# Altium footprint library ICs_VendorSpecific.PcbLib: 247 footprints (part 10 of 19)
Each footprint in its own frame and in the unit in brackets; x right, y up, seen from the top. Pads: shape width x height; smd on the part's side, far side on the other; paste and mask are expansions set on the pad; w line width, h text height; cw(c..) or ccw(c..) is an arc to the next point about the centre after c.
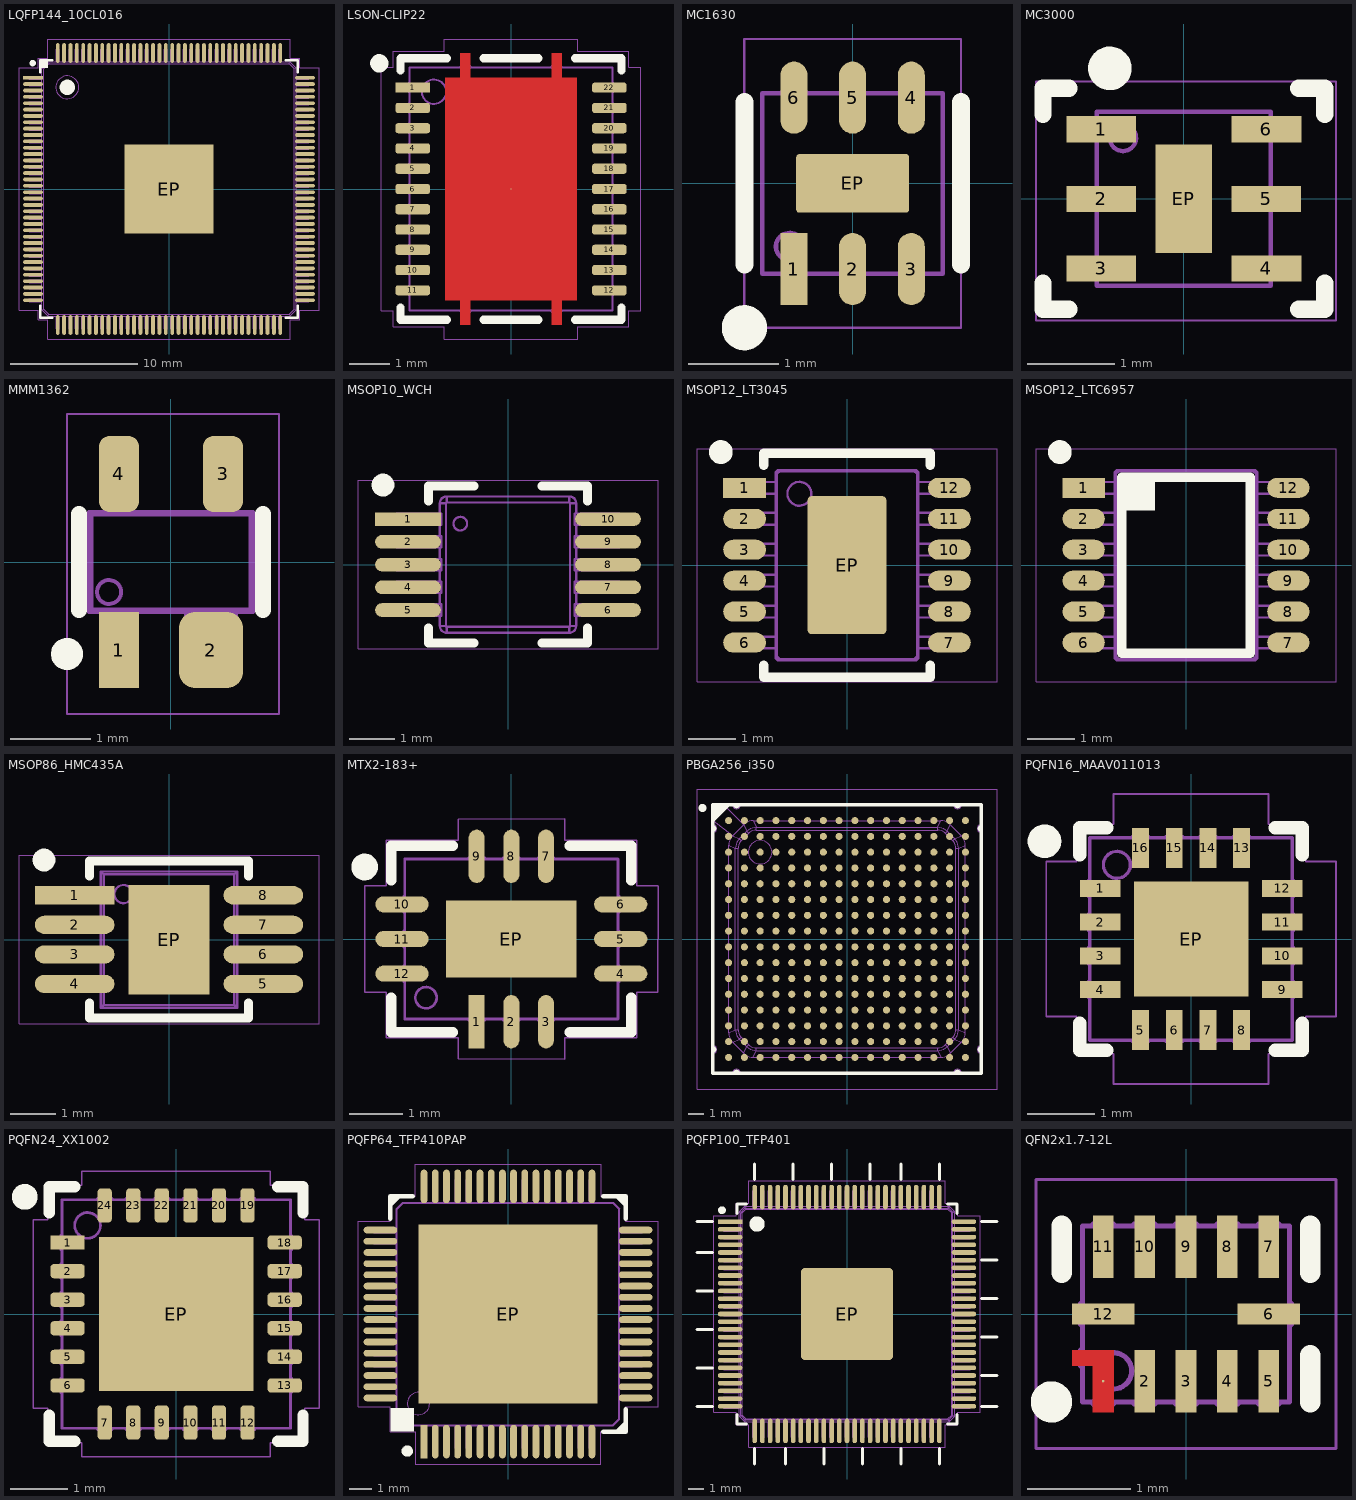
[diagram p9: the footprints below, top view; thin cyan lines are the x and y axes]

## LQFP144_10CL016 [mm] "LQFP-144, 144-Leads, Body 20.00x20.00mm, Pitch 0.50mm, Thermal Pad 6.7x6.7mm"
height 1.4
pads (145):
  rect 1.55x0.3 smd paste+0 mask+0.05: 1(-10.7,8.75)
  oval 1.55x0.3 smd paste+0 mask+0.05: 2(-10.7,8.25) 3(-10.7,7.75) 4(-10.7,7.25) 5(-10.7,6.75) 6(-10.7,6.25) 7(-10.7,5.75) 8(-10.7,5.25) 9(-10.7,4.75) 10(-10.7,4.25) 11(-10.7,3.75) 12(-10.7,3.25) 13(-10.7,2.75) 14(-10.7,2.25) 15(-10.7,1.75) 16(-10.7,1.25) 17(-10.7,0.75) 18(-10.7,0.25) 19(-10.7,-0.25) 20(-10.7,-0.75) 21(-10.7,-1.25) 22(-10.7,-1.75) 23(-10.7,-2.25) 24(-10.7,-2.75) 25(-10.7,-3.25) 26(-10.7,-3.75) 27(-10.7,-4.25) 28(-10.7,-4.75) 29(-10.7,-5.25) 30(-10.7,-5.75) 31(-10.7,-6.25) 32(-10.7,-6.75) 33(-10.7,-7.25) 34(-10.7,-7.75) 35(-10.7,-8.25) 36(-10.7,-8.75) 73(10.7,-8.75) 74(10.7,-8.25) 75(10.7,-7.75) 76(10.7,-7.25) 77(10.7,-6.75) 78(10.7,-6.25) 79(10.7,-5.75) 80(10.7,-5.25) 81(10.7,-4.75) 82(10.7,-4.25) 83(10.7,-3.75) 84(10.7,-3.25) 85(10.7,-2.75) 86(10.7,-2.25) 87(10.7,-1.75) 88(10.7,-1.25) 89(10.7,-0.75) 90(10.7,-0.25) 91(10.7,0.25) 92(10.7,0.75) 93(10.7,1.25) 94(10.7,1.75) 95(10.7,2.25) 96(10.7,2.75) 97(10.7,3.25) 98(10.7,3.75) 99(10.7,4.25) 100(10.7,4.75) 101(10.7,5.25) 102(10.7,5.75) 103(10.7,6.25) 104(10.7,6.75) 105(10.7,7.25) 106(10.7,7.75) 107(10.7,8.25) 108(10.7,8.75)
  oval 0.3x1.55 smd paste+0 mask+0.05: 37(-8.75,-10.7) 38(-8.25,-10.7) 39(-7.75,-10.7) 40(-7.25,-10.7) 41(-6.75,-10.7) 42(-6.25,-10.7) 43(-5.75,-10.7) 44(-5.25,-10.7) 45(-4.75,-10.7) 46(-4.25,-10.7) 47(-3.75,-10.7) 48(-3.25,-10.7) 49(-2.75,-10.7) 50(-2.25,-10.7) 51(-1.75,-10.7) 52(-1.25,-10.7) 53(-0.75,-10.7) 54(-0.25,-10.7) 55(0.25,-10.7) 56(0.75,-10.7) 57(1.25,-10.7) 58(1.75,-10.7) 59(2.25,-10.7) 60(2.75,-10.7) 61(3.25,-10.7) 62(3.75,-10.7) 63(4.25,-10.7) 64(4.75,-10.7) 65(5.25,-10.7) 66(5.75,-10.7) 67(6.25,-10.7) 68(6.75,-10.7) 69(7.25,-10.7) 70(7.75,-10.7) 71(8.25,-10.7) 72(8.75,-10.7) 109(8.75,10.7) 110(8.25,10.7) 111(7.75,10.7) 112(7.25,10.7) 113(6.75,10.7) 114(6.25,10.7) 115(5.75,10.7) 116(5.25,10.7) 117(4.75,10.7) 118(4.25,10.7) 119(3.75,10.7) 120(3.25,10.7) 121(2.75,10.7) 122(2.25,10.7) 123(1.75,10.7) 124(1.25,10.7) 125(0.75,10.7) 126(0.25,10.7) 127(-0.25,10.7) 128(-0.75,10.7) 129(-1.25,10.7) 130(-1.75,10.7) 131(-2.25,10.7) 132(-2.75,10.7) 133(-3.25,10.7) 134(-3.75,10.7) 135(-4.25,10.7) 136(-4.75,10.7) 137(-5.25,10.7) 138(-5.75,10.7) 139(-6.25,10.7) 140(-6.75,10.7) 141(-7.25,10.7) 142(-7.75,10.7) 143(-8.25,10.7) 144(-8.75,10.7)
  rect 7x7 smd paste-5 mask+0.05: EP(0,0)
Top Overlay:
  circle w0.25: c-10.725,9.9 r0.125
  circle w0.6: c-8,8 r0.3
  rectangle: -10.175,9.5 -9.5,10.175
  lines w0.2: -10.125,-9.2 -10.125,-10.125 -9.2,-10.125 ; -10.125,9.2 -10.125,10.125 -9.2,10.125 ; -10.075,9.6 -10.075,10.075 -9.6,10.075 ; 9.2,-10.125 10.125,-10.125 10.125,-9.2 ; 9.2,10.125 10.125,10.125 10.125,9.2
Top Paste:
  rectangle: 1.95,1.95 3.45,3.45
  rectangle: -3.45,1.95 -1.95,3.45
  rectangle: -1.65,1.95 -0.15,3.45
  rectangle: 0.15,1.95 1.65,3.45
  rectangle: -3.45,0.15 -1.95,1.65
  rectangle: -1.65,0.15 -0.15,1.65
  rectangle: 0.15,0.15 1.65,1.65
  rectangle: -3.45,-3.45 -1.95,-1.95
  rectangle: -3.45,-1.65 -1.95,-0.15
  rectangle: 1.95,-3.45 3.45,-1.95
  rectangle: 1.95,-1.65 3.45,-0.15
  rectangle: 1.95,0.15 3.45,1.65
  rectangle: -1.65,-3.45 -0.15,-1.95
  rectangle: 0.15,-3.45 1.65,-1.95
  rectangle: -1.65,-1.65 -0.15,-0.15
  rectangle: 0.15,-1.65 1.65,-0.15
Top Courtyard:
  lines w0.025: -11.8,-9.55 -11.8,9.55 -10.3,9.55 -10.3,10.3 -9.55,10.3 -9.55,11.8 9.55,11.8 9.55,10.3 10.3,10.3 10.3,9.55 11.8,9.55 11.8,-9.55 10.3,-9.55 10.3,-10.3 9.55,-10.3 9.55,-11.8 -9.55,-11.8 -9.55,-10.3 -10.3,-10.3 -10.3,-9.55 -11.8,-9.55
Top Assembly:
  drawing of 1033 lines, arcs and shapes, not listed
  text ".Designator" at -6.763,-0.679 h3
3D body "LQFP144_10CL016.x_t": height 1.5, standoff 0, extent -11,-11 11,11

## LSON-CLIP22 [mm] "DFN, 22-Leads, Body 6x5mm, Pitch 0.50mm, Thermal Pad 3.24x5.49mm. TI Reference R-PSON-N22"
height 1.5
pads (23):
  rect 0.85x0.25 smd mask+0.05: 1(-2.425,2.5)
  rrect50% 0.85x0.25 smd mask+0.05: 2(-2.425,2) 3(-2.425,1.5) 4(-2.425,1) 5(-2.425,0.5) 6(-2.425,0) 7(-2.425,-0.5) 8(-2.425,-1) 9(-2.425,-1.5) 10(-2.425,-2) 11(-2.425,-2.5) 12(2.425,-2.5) 13(2.425,-2) 14(2.425,-1.5) 15(2.425,-1) 16(2.425,-0.5) 17(2.425,0) 18(2.425,0.5) 19(2.425,1) 20(2.425,1.5) 21(2.425,2) 22(2.425,2.5)
  round 0.025 smd paste-5 mask+0.05: EP(0,0)
Top Layer:
  region: -1.62,-2.74 -1.25,-2.74 -1.25,-3.35 -1,-3.35 -1,-2.74 1,-2.74 1,-3.35 1.25,-3.35 1.25,-2.74 1.62,-2.74 1.62,2.74 1.25,2.74 1.25,3.35 1,3.35 1,2.74 -1,2.74 -1,3.35 -1.25,3.35 -1.25,2.74 -1.62,2.74 -1.62,2.739
Top Overlay:
  circle w0.25: c-3.25,3.1 r0.1
  lines w0.2: -2.725,-2.925 -2.725,-3.225 -1.575,-3.225 ; -2.725,2.925 -2.725,3.225 -1.575,3.225 ; -0.675,-3.225 0.675,-3.225 ; -0.675,3.225 0.675,3.225 ; 1.575,-3.225 2.725,-3.225 2.725,-2.925 ; 1.575,3.225 2.725,3.225 2.725,2.925
Top Paste:
  region: 0.15,0.65 0.15,-0.65 1.45,-0.65 1.45,0.65
  region: 0.15,2.25 0.15,0.95 1.45,0.95 1.45,2.25
  region: 1.45,-2.25 1.45,-0.95 0.15,-0.95 0.15,-2.25
  region: -1.45,0.65 -1.45,-0.65 -0.15,-0.65 -0.15,0.65
  region: -1.45,2.25 -1.45,0.95 -0.15,0.95 -0.15,2.25
  region: -0.15,-2.25 -0.15,-0.95 -1.45,-0.95 -1.45,-2.25
Top Courtyard:
  lines w0.025: -3.2,-3 -2.9,-3 -2.9,-3.4 -1.65,-3.4 -1.65,-3.7 1.65,-3.7 1.65,-3.4 2.9,-3.4 2.9,-3 3.2,-3 3.2,3 2.9,3 2.9,3.4 1.65,3.4 1.65,3.7 -1.65,3.7 -1.65,3.4 -2.9,3.4 -2.9,3 -3.2,3 -3.2,-3
Top Assembly:
  circle w0.05: c-1.9,2.4 r0.3
  lines w0.05: -2.5,-2.625 -2.52,-2.625 -2.52,-2.375 -2.5,-2.375 ; -2.5,-2.125 -2.52,-2.125 -2.52,-1.875 -2.5,-1.875 ; -2.5,-1.625 -2.52,-1.625 -2.52,-1.375 -2.5,-1.375 ; -2.5,-1.125 -2.52,-1.125 -2.52,-0.875 -2.5,-0.875 ; -2.5,-0.625 -2.52,-0.625 -2.52,-0.375 -2.5,-0.375 ; -2.5,-0.125 -2.52,-0.125 -2.52,0.125 -2.5,0.125 ; -2.5,0.375 -2.52,0.375 -2.52,0.625 -2.5,0.625 ; -2.5,0.875 -2.52,0.875 -2.52,1.125 -2.5,1.125 ; -2.5,1.375 -2.52,1.375 -2.52,1.625 -2.5,1.625 ; -2.5,1.875 -2.52,1.875 -2.52,2.125 -2.5,2.125 ; -2.5,2.375 -2.52,2.375 -2.52,2.625 -2.5,2.625 ; -1.25,-3 -1.25,-3.02 -1,-3.02 -1,-3 ; -1.25,3 -1.25,3.02 -1,3.02 -1,3 ; 1,-3 1,-3.02 1.25,-3.02 1.25,-3 ; 1,3 1,3.02 1.25,3.02 1.25,3 ; 2.5,-2.625 2.52,-2.625 2.52,-2.375 2.5,-2.375 ; 2.5,-2.125 2.52,-2.125 2.52,-1.875 2.5,-1.875 ; 2.5,-1.625 2.52,-1.625 2.52,-1.375 2.5,-1.375 ; 2.5,-1.125 2.52,-1.125 2.52,-0.875 2.5,-0.875 ; 2.5,-0.625 2.52,-0.625 2.52,-0.375 2.5,-0.375 ; 2.5,-0.125 2.52,-0.125 2.52,0.125 2.5,0.125 ; 2.5,0.375 2.52,0.375 2.52,0.625 2.5,0.625 ; 2.5,0.875 2.52,0.875 2.52,1.125 2.5,1.125 ; 2.5,1.375 2.52,1.375 2.52,1.625 2.5,1.625 ; 2.5,1.875 2.52,1.875 2.52,2.125 2.5,2.125 ; 2.5,2.375 2.52,2.375 2.52,2.625 2.5,2.625 ; -2.5,-3 -2.5,3 2.5,3 2.5,-3 -2.5,-3
  text ".Designator" at -4.511,-0.453 h2
3D body "LSON-CLIP22(R-PSON-N22).x_t": height 1.52, standoff 0, extent -2.52,-3.02 2.52,3.02

## MC1630 [mm] "MC1630 Minicircuits case style"
height 0.8
pads (7):
  rect 0.3x0.8 smd paste+0 mask+0.05: 1(-0.65,-0.95)
  oval 0.3x0.8 smd paste+0 mask+0.05: 2(0,-0.95) 3(0.65,-0.95) 4(0.65,0.95) 5(0,0.95) 6(-0.65,0.95)
  rrect10% 1.25x0.65 smd mask+0.05: EP(0,0)
Top Overlay:
  circle w0.25: c-1.2,-1.6 r0.125
  lines w0.2: -1.2,-0.9 -1.2,0.9 ; 1.2,-0.9 1.2,0.9
Top Solder:
  rectangle: -1,-1.4 -0.85,-0.5
  region: 1,-0.5 0.65,-0.5 0.65,-1.4 1,-1.4
  region: 1,1.4 0.65,1.4 0.65,0.5 1,0.5
  rectangle: -1,0.5 -0.65,1.4
Top Courtyard:
  lines w0.025: -1.2,-1.6 -1.2,1.6 1.2,1.6 1.2,-1.6 -1.2,-1.6
Top Assembly:
  circle w0.05: c-0.7,-0.7 r0.15
  lines w0.05: -0.775,-1 -0.775,-1.025 -0.525,-1.025 -0.525,-1 ; -0.775,1 -0.775,1.025 -0.525,1.025 -0.525,1 ; -0.125,-1 -0.125,-1.025 0.125,-1.025 0.125,-1 ; -0.125,1 -0.125,1.025 0.125,1.025 0.125,1 ; 0.525,-1 0.525,-1.025 0.775,-1.025 0.775,-1 ; 0.525,1 0.525,1.025 0.775,1.025 0.775,1 ; -1,-1 -1,1 1,1 1,-1 -1,-1
  text ".Designator" at -2.704,-0.271 h1.2
3D body "MC1630_X_T.x_t": height 0.85, standoff 0, extent -1,-1.025 1,1.025

## MC3000 [mm] "Mini-Circuits MC3000 Case Style"
height 1
pads (7):
  rect 0.8x0.3 smd paste-0.023 mask+0.05: 1(-0.95,0.8) 2(-0.95,0) 3(-0.95,-0.8) 4(0.95,-0.8) 5(0.95,0) 6(0.95,0.8)
  rect 0.65x1.25 smd paste-0.045 mask+0.092: EP(0,0)
Top Overlay:
  circle w0.25: c-0.85,1.5 r0.125
  lines w0.2: -1.62,-0.97 -1.62,-1.27 -1.32,-1.27 ; -1.62,0.97 -1.62,1.27 -1.32,1.27 ; 1.32,-1.27 1.62,-1.27 1.62,-0.97 ; 1.32,1.27 1.62,1.27 1.62,0.97
Top Solder:
  rectangle: 0.5,0.47 1.4,0.6
  rectangle: -1.401,0.47 -0.501,0.6
  rectangle: -1.401,-0.6 -0.501,-0.47
  rectangle: 0.5,-0.6 1.4,-0.47
Top Courtyard:
  lines w0.025: -1.7,-1.4 -1.7,1.35 1.75,1.35 1.75,-1.4 -1.7,-1.4
Top Assembly:
  lines w0.05: -0.55,0.718 ccw(c-0.7,0.7) -0.549,0.696 ; -1,-1 -1,0 -1,1 0,1 1,1 1,0 1,-1 0,-1 -1,-1
  text ".Designator" at -3.378,-0.339 h1.5
3D body "MC3000.x_t": height 1.05, standoff 0, extent -1.02,-1 1.02,1

## MMM1362 [mm] "Case style MMM1362"
height 1.1
pads (4):
  rect 0.5x0.95 smd paste-0.025 mask+0.05: 1(-0.65,-1.1)
  rrect50% 0.8x0.95 smd paste-0.025 mask+0.05: 2(0.5,-1.1)
  rrect50% 0.5x0.95 smd paste-0.025 mask+0.05: 3(0.65,1.1) 4(-0.65,1.1)
Top Overlay:
  circle w0.2: c-1.3,-1.15 r0.1
  lines w0.2: -1.15,-0.6 -1.15,0.6 ; 1.15,-0.6 1.15,0.6
Top Courtyard:
  lines w0.025: -1.3,-1.9 1.35,-1.9 1.35,1.85 -1.3,1.85 -1.3,-1.9
Top Assembly:
  circle w0.05: c-0.775,-0.375 r0.15
  lines w0.05: -1.025,-0.625 -0.813,-0.625 ; -1.025,-0.625 -1.025,0.625 ; -1.025,-0.625 -0.995,-0.595 ; -1.025,0.625 -0.813,0.625 ; -1.025,0.625 -0.995,0.595 ; -0.995,-0.595 0.995,-0.595 ; -0.995,-0.595 -0.995,0.595 ; -0.995,0.595 0.995,0.595 ; -0.813,-0.961 -0.813,-1.055 -0.487,-1.055 -0.487,-0.961 ; -0.813,-0.961 -0.813,-0.893 ; -0.813,-0.961 -0.487,-0.961 ; -0.813,-0.893 -0.487,-0.893 ; -0.813,-0.893 -0.813,-0.834 ; -0.813,-0.834 -0.813,-0.686 ; -0.813,-0.834 -0.487,-0.834 ; -0.813,-0.686 -0.813,-0.625 ; -0.813,-0.686 -0.487,-0.686 ; -0.813,-0.625 -0.487,-0.625 ; -0.813,0.625 -0.487,0.625 ; -0.813,0.625 -0.813,0.686 ; -0.813,0.686 -0.487,0.686 ; -0.813,0.686 -0.813,0.834 ; -0.813,0.834 -0.813,0.893 ; -0.813,0.834 -0.487,0.834 ; -0.813,0.893 -0.813,0.961 ; -0.813,0.893 -0.487,0.893 ; -0.813,0.961 -0.813,1.055 -0.487,1.055 -0.487,0.961 ; -0.813,0.961 -0.487,0.961 ; -0.487,-0.961 -0.487,-0.893 ; -0.487,-0.893 -0.487,-0.834 ; -0.487,-0.834 -0.487,-0.686 ; -0.487,-0.686 -0.487,-0.625 ; -0.487,-0.625 0.188,-0.625 ; -0.487,0.625 0.487,0.625 ; -0.487,0.625 -0.487,0.686 ; -0.487,0.686 -0.487,0.834 ; -0.487,0.834 -0.487,0.893 ; -0.487,0.893 -0.487,0.961 ; 0.188,-0.961 0.188,-1.055 0.813,-1.055 0.812,-0.961 ; 0.188,-0.961 0.812,-0.961 ; 0.188,-0.961 0.188,-0.893 ; 0.188,-0.893 0.188,-0.834 ; 0.188,-0.893 0.812,-0.893 ; 0.188,-0.834 0.188,-0.686 ; 0.188,-0.834 0.813,-0.834 ; 0.188,-0.686 0.188,-0.625 ; 0.188,-0.686 0.813,-0.686 ; 0.188,-0.625 0.813,-0.625 ; 0.487,0.625 0.813,0.625 ; 0.487,0.625 0.487,0.686 ; 0.487,0.686 0.487,0.834 ; 0.487,0.686 0.813,0.686 ; 0.487,0.834 0.487,0.893 ; 0.487,0.834 0.812,0.834 ; 0.487,0.893 0.487,0.961 ; 0.487,0.893 0.812,0.893 ; 0.487,0.961 0.487,1.055 0.813,1.055 0.813,0.961 ; 0.487,0.961 0.813,0.961 ; 0.812,-0.961 0.812,-0.893 ; 0.812,-0.893 0.813,-0.834 ; 0.813,-0.834 0.813,-0.686 ; 0.813,-0.686 0.813,-0.625 ; 0.813,-0.625 1.025,-0.625 ; 0.813,0.625 1.025,0.625 ; 0.813,0.625 0.813,0.686 ; 0.813,0.686 0.812,0.834 ; 0.812,0.834 0.812,0.893 ; 0.812,0.893 0.813,0.961 ; 0.995,-0.595 1.025,-0.625 ; 0.995,-0.595 0.995,0.595 ; 0.995,0.595 1.025,0.625 ; 1.025,-0.625 1.025,0.625
  text ".Designator" at -2.252,-0.226 h1
3D body "MMM1362.x_t": height 1.1, standoff 0, extent -1.025,-1.055 1.025,1.055

## MSOP10_WCH [mm] "MSOP, 10-Leads, Body 3.00x3.00mm, Pitch 0.5mm"
height 0.85
pads (10):
  rect 1.45x0.3 smd paste+0 mask+0.05: 1(-2.2,1)
  oval 1.45x0.3 smd paste+0 mask+0.05: 2(-2.2,0.5) 3(-2.2,0) 4(-2.2,-0.5) 5(-2.2,-1) 6(2.2,-1) 7(2.2,-0.5) 8(2.2,0) 9(2.2,0.5) 10(2.2,1)
Top Overlay:
  circle w0.25: c-2.75,1.75 r0.125
  lines w0.2: -1.75,-1.4 -1.75,-1.725 -0.75,-1.725 ; -1.75,1.4 -1.75,1.725 -0.75,1.725 ; 0.75,-1.725 1.75,-1.725 1.75,-1.4 ; 0.75,1.725 1.75,1.725 1.75,1.4
Top Courtyard:
  lines w0.025: -3.3,-1.85 3.3,-1.85 3.3,1.85 -3.3,1.85 -3.3,-1.85
Top Assembly:
  drawing of 195 lines, arcs and shapes, not listed
  text ".Designator" at -3.378,-0.339 h1.5
3D body "MSOP10_WCH.x_t": height 0.93, standoff 0, extent -2.45,-1.5 2.45,1.5

## MSOP12_LT3045 [mm] "MSOP, 12-Leads, Body 3.00x4.00mm, Exposed Pad 1.651x2.845mm, Pitch 0.65mm. Reference LTC DWG # 05-08-1666 Rev G"
height 1.1
pads (13):
  rect 0.9x0.42 smd paste+0 mask+0.05: 1(-2.15,1.625)
  oval 0.9x0.42 smd paste+0 mask+0.05: 2(-2.15,0.975) 3(-2.15,0.325) 4(-2.15,-0.325) 5(-2.15,-0.975) 6(-2.15,-1.625) 7(2.15,-1.625) 8(2.15,-0.975) 9(2.15,-0.325) 10(2.15,0.325) 11(2.15,0.975) 12(2.15,1.625)
  rrect10% 1.65x2.9 smd paste+0 mask+0.05: EP(0,0)
Top Overlay:
  circle w0.25: c-2.65,2.375 r0.125
  lines w0.2: -1.75,-2.1 -1.75,-2.35 1.75,-2.35 1.75,-2.1 ; -1.75,2.1 -1.75,2.35 1.75,2.35 1.75,2.1
Top Courtyard:
  lines w0.025: -3.15,-2.45 -3.15,2.45 3.15,2.45 3.15,-2.45 -3.15,-2.45
Top Assembly:
  circle w0.05: c-1,1.5 r0.25
  lines w0.05: -2.063,-1.747 -2.063,-1.502 ; -2.063,-1.098 -2.063,-0.853 ; -2.063,-0.447 -2.063,-0.202 ; -2.063,0.202 -2.063,0.447 ; -2.063,0.853 -2.063,1.098 ; -2.063,1.502 -2.063,1.747 ; -1.982,-1.747 -1.982,-1.502 ; -1.982,-1.098 -1.982,-0.853 ; -1.982,-0.447 -1.982,-0.202 ; -1.982,0.202 -1.982,0.447 ; -1.982,0.853 -1.982,1.098 ; -1.982,1.502 -1.982,1.747 ; -1.926,-1.747 -1.926,-1.502 ; -1.926,-1.098 -1.926,-0.853 ; -1.926,-0.447 -1.926,-0.202 ; -1.926,0.202 -1.926,0.447 ; -1.926,0.853 -1.926,1.098 ; -1.926,1.502 -1.926,1.747 ; -1.752,-1.747 -1.752,-1.502 ; -1.752,-1.098 -1.752,-0.853 ; -1.752,-0.447 -1.752,-0.202 ; -1.752,0.202 -1.752,0.447 ; -1.752,0.853 -1.752,1.098 ; -1.752,1.502 -1.752,1.747 ; -1.5,-1.747 -2.45,-1.747 -2.45,-1.502 -1.5,-1.502 ; -1.5,-1.098 -2.45,-1.098 -2.45,-0.853 -1.5,-0.853 ; -1.5,-0.447 -2.45,-0.447 -2.45,-0.202 -1.5,-0.202 ; -1.5,0.202 -2.45,0.202 -2.45,0.447 -1.5,0.447 ; -1.5,0.853 -2.45,0.853 -2.45,1.098 -1.5,1.098 ; -1.5,1.502 -2.45,1.502 -2.45,1.747 -1.5,1.747 ; -1.449,2 -1.42,1.97 ; 1.449,2 1.42,1.97 ; 1.5,-1.747 2.45,-1.747 2.45,-1.502 1.5,-1.502 ; 1.5,-1.098 2.45,-1.098 2.45,-0.853 1.5,-0.853 ; 1.5,-0.447 2.45,-0.447 2.45,-0.202 1.5,-0.202 ; 1.5,0.202 2.45,0.202 2.45,0.447 1.5,0.447 ; 1.5,0.853 2.45,0.853 2.45,1.098 1.5,1.098 ; 1.5,1.502 2.45,1.502 2.45,1.747 1.5,1.747 ; 1.752,-1.747 1.752,-1.502 ; 1.752,-1.098 1.752,-0.853 ; 1.752,-0.447 1.752,-0.202 ; 1.752,0.202 1.752,0.447 ; 1.752,0.853 1.752,1.098 ; 1.752,1.502 1.752,1.747 ; 1.926,-1.747 1.926,-1.502 ; 1.926,-1.098 1.926,-0.853 ; 1.926,-0.447 1.926,-0.202 ; 1.926,0.202 1.926,0.447 ; 1.926,0.853 1.926,1.098 ; 1.926,1.502 1.926,1.747 ; 1.982,-1.747 1.982,-1.502 ; 1.982,-1.098 1.982,-0.853 ; 1.982,-0.447 1.982,-0.202 ; 1.982,0.202 1.982,0.447 ; 1.982,0.853 1.982,1.098 ; 1.982,1.502 1.982,1.747 ; 2.063,-1.747 2.063,-1.502 ; 2.063,-1.098 2.063,-0.853 ; 2.063,-0.447 2.063,-0.202 ; 2.063,0.202 2.063,0.447 ; 2.063,0.853 2.063,1.098 ; 2.063,1.502 2.063,1.747 ; -1.5,-1.95 -1.45,-2 ; -1.5,-1.949 -1.47,-1.92 ; -1.5,-1.95 -1.5,1.95 ; -1.5,1.95 -1.45,2 1.45,2 1.5,1.95 ; -1.5,1.95 -1.47,1.92 ; -1.47,-1.92 -1.47,1.92 ; -1.47,-1.92 -1.42,-1.97 ; -1.47,1.92 -1.42,1.97 ; -1.45,-2 1.45,-2 ; -1.45,-2 -1.42,-1.97 ; -1.42,-1.97 1.42,-1.97 ; -1.42,1.97 1.42,1.97 ; 1.42,-1.97 1.45,-2 ; 1.42,-1.97 1.47,-1.92 ; 1.42,1.97 1.47,1.92 ; 1.45,-2 1.5,-1.95 ; 1.47,-1.92 1.5,-1.949 ; 1.47,-1.92 1.47,1.92 ; 1.47,1.92 1.5,1.95 ; 1.5,-1.95 1.5,1.95
  text ".Designator" at 0.453,-4.511 h2
3D body "MSOP12_LT3045_X_T.x_t": height 0.93, standoff -0.03, extent -2.45,-2 2.45,2

## MSOP12_LTC6957 [mm] "MSOP, 12-Leads, Body 3.00x4.00mm, Pitch 0.65mm. Reference LTC DWG  # 05-08-1668 Rev A"
height 1.1
pads (12):
  rect 0.889x0.42 smd paste+0 mask+0.05: 1(-2.15,1.625)
  oval 0.889x0.42 smd paste+0 mask+0.05: 2(-2.15,0.975) 3(-2.15,0.325) 4(-2.15,-0.325) 5(-2.15,-0.975) 6(-2.15,-1.625) 7(2.15,-1.625) 8(2.15,-0.975) 9(2.15,-0.325) 10(2.15,0.325) 11(2.15,0.975) 12(2.15,1.625)
Top Overlay:
  circle w0.25: c-2.65,2.375 r0.125
  region: -0.65,1.15 -0.65,1.85 -1.35,1.85 -1.35,1.15
  lines w0.2: -1.35,-1.85 1.35,-1.85 1.35,1.85 -1.35,1.85 -1.35,-1.85
Top Courtyard:
  lines w0.025: -3.15,-2.45 -3.15,2.45 3.15,2.45 3.15,-2.45 -3.15,-2.45
Top Assembly:
  circle w0.05: c-1,1.5 r0.25
  lines w0.05: -2.063,-1.747 -2.063,-1.502 ; -2.063,-1.098 -2.063,-0.853 ; -2.063,-0.447 -2.063,-0.202 ; -2.063,0.202 -2.063,0.447 ; -2.063,0.853 -2.063,1.098 ; -2.063,1.502 -2.063,1.747 ; -1.982,-1.747 -1.982,-1.502 ; -1.982,-1.098 -1.982,-0.853 ; -1.982,-0.447 -1.982,-0.202 ; -1.982,0.202 -1.982,0.447 ; -1.982,0.853 -1.982,1.098 ; -1.982,1.502 -1.982,1.747 ; -1.926,-1.747 -1.926,-1.502 ; -1.926,-1.098 -1.926,-0.853 ; -1.926,-0.447 -1.926,-0.202 ; -1.926,0.202 -1.926,0.447 ; -1.926,0.853 -1.926,1.098 ; -1.926,1.502 -1.926,1.747 ; -1.752,-1.747 -1.752,-1.502 ; -1.752,-1.098 -1.752,-0.853 ; -1.752,-0.447 -1.752,-0.202 ; -1.752,0.202 -1.752,0.447 ; -1.752,0.853 -1.752,1.098 ; -1.752,1.502 -1.752,1.747 ; -1.5,-1.747 -2.45,-1.747 -2.45,-1.502 -1.5,-1.502 ; -1.5,-1.098 -2.45,-1.098 -2.45,-0.853 -1.5,-0.853 ; -1.5,-0.447 -2.45,-0.447 -2.45,-0.202 -1.5,-0.202 ; -1.5,0.202 -2.45,0.202 -2.45,0.447 -1.5,0.447 ; -1.5,0.853 -2.45,0.853 -2.45,1.098 -1.5,1.098 ; -1.5,1.502 -2.45,1.502 -2.45,1.747 -1.5,1.747 ; -1.449,2 -1.42,1.97 ; 1.449,2 1.42,1.97 ; 1.5,-1.747 2.45,-1.747 2.45,-1.502 1.5,-1.502 ; 1.5,-1.098 2.45,-1.098 2.45,-0.853 1.5,-0.853 ; 1.5,-0.447 2.45,-0.447 2.45,-0.202 1.5,-0.202 ; 1.5,0.202 2.45,0.202 2.45,0.447 1.5,0.447 ; 1.5,0.853 2.45,0.853 2.45,1.098 1.5,1.098 ; 1.5,1.502 2.45,1.502 2.45,1.747 1.5,1.747 ; 1.752,-1.747 1.752,-1.502 ; 1.752,-1.098 1.752,-0.853 ; 1.752,-0.447 1.752,-0.202 ; 1.752,0.202 1.752,0.447 ; 1.752,0.853 1.752,1.098 ; 1.752,1.502 1.752,1.747 ; 1.926,-1.747 1.926,-1.502 ; 1.926,-1.098 1.926,-0.853 ; 1.926,-0.447 1.926,-0.202 ; 1.926,0.202 1.926,0.447 ; 1.926,0.853 1.926,1.098 ; 1.926,1.502 1.926,1.747 ; 1.982,-1.747 1.982,-1.502 ; 1.982,-1.098 1.982,-0.853 ; 1.982,-0.447 1.982,-0.202 ; 1.982,0.202 1.982,0.447 ; 1.982,0.853 1.982,1.098 ; 1.982,1.502 1.982,1.747 ; 2.063,-1.747 2.063,-1.502 ; 2.063,-1.098 2.063,-0.853 ; 2.063,-0.447 2.063,-0.202 ; 2.063,0.202 2.063,0.447 ; 2.063,0.853 2.063,1.098 ; 2.063,1.502 2.063,1.747 ; -1.5,-1.95 -1.45,-2 ; -1.5,-1.949 -1.47,-1.92 ; -1.5,-1.95 -1.5,1.95 ; -1.5,1.95 -1.45,2 1.45,2 1.5,1.95 ; -1.5,1.95 -1.47,1.92 ; -1.47,-1.92 -1.47,1.92 ; -1.47,-1.92 -1.42,-1.97 ; -1.47,1.92 -1.42,1.97 ; -1.45,-2 1.45,-2 ; -1.45,-2 -1.42,-1.97 ; -1.42,-1.97 1.42,-1.97 ; -1.42,1.97 1.42,1.97 ; 1.42,-1.97 1.45,-2 ; 1.42,-1.97 1.47,-1.92 ; 1.42,1.97 1.47,1.92 ; 1.45,-2 1.5,-1.95 ; 1.47,-1.92 1.5,-1.949 ; 1.47,-1.92 1.47,1.92 ; 1.47,1.92 1.5,1.95 ; 1.5,-1.95 1.5,1.95
  text ".Designator" at 0.453,-4.511 h2
3D body "MSOP12_LTC6957.x_t": height 0.93, standoff -0.03, extent -2.45,-2 2.45,2

## MSOP86_HMC435A [mm] "MSOP, 8-Leads, Body 3.00x3.00mm, Exposed Pad 1.78x2.41mm, Pitch 0.65mm"
height 0.85
pads (9):
  rect 1.75x0.4 smd paste+0 mask+0.05: 1(-2.075,0.975)
  oval 1.75x0.4 smd paste+0 mask+0.05: 2(-2.075,0.325) 3(-2.075,-0.325) 4(-2.075,-0.975) 5(2.075,-0.975) 6(2.075,-0.325) 7(2.075,0.325) 8(2.075,0.975)
  rect 1.78x2.41 smd paste-2 mask+0.05: EP(0,0)
Top Overlay:
  circle w0.25: c-2.75,1.75 r0.125
  lines w0.2: -1.75,-1.4 -1.75,-1.725 1.75,-1.725 1.75,-1.4 ; -1.75,1.4 -1.75,1.725 1.75,1.725 1.75,1.4
Top Paste:
  region: -0.1,1.1 -0.7,1.1 -0.7,0.5 -0.1,0.5
  region: -0.1,0.3 -0.7,0.3 -0.7,-0.3 -0.1,-0.3
  region: -0.1,-0.5 -0.7,-0.5 -0.7,-1.1 -0.1,-1.1
  rectangle: 0.1,0.5 0.7,1.1
  rectangle: 0.1,-0.3 0.7,0.3
  rectangle: 0.1,-1.1 0.7,-0.5
Top Courtyard:
  lines w0.025: -3.3,-1.85 3.3,-1.85 3.3,1.85 -3.3,1.85 -3.3,-1.85
Top Assembly:
  circle w0.05: c-1,1 r0.2
  lines w0.05: -2.1,-1.125 -2,-1.125 ; -2.1,-1.125 -2.1,-0.825 ; -2.1,-1.125 -2.5,-1.125 -2.5,-0.825 -2.1,-0.825 ; -2.1,-0.825 -2,-0.825 ; -2.1,-0.475 -2,-0.475 ; -2.1,-0.475 -2.1,-0.175 ; -2.1,-0.475 -2.5,-0.475 -2.5,-0.175 -2.1,-0.175 ; -2.1,-0.175 -2,-0.175 ; -2.1,0.175 -2,0.175 ; -2.1,0.175 -2.1,0.475 ; -2.1,0.175 -2.5,0.175 -2.5,0.475 -2.1,0.475 ; -2.1,0.475 -2,0.475 ; -2.1,0.825 -2,0.825 ; -2.1,0.825 -2.1,1.125 ; -2.1,0.825 -2.5,0.825 -2.5,1.125 -2.1,1.125 ; -2.1,1.125 -2,1.125 ; -2,-1.125 -1.8,-1.125 ; -2,-1.125 -2,-0.825 ; -2,-0.825 -1.8,-0.825 ; -2,-0.475 -1.8,-0.475 ; -2,-0.475 -2,-0.175 ; -2,-0.175 -1.8,-0.175 ; -2,0.175 -1.8,0.175 ; -2,0.175 -2,0.475 ; -2,0.475 -1.8,0.475 ; -2,0.825 -1.8,0.825 ; -2,0.825 -2,1.125 ; -2,1.125 -1.8,1.125 ; -1.8,-1.125 -1.8,-0.825 ; -1.8,-1.125 -1.5,-1.125 ; -1.8,-0.825 -1.5,-0.825 ; -1.8,-0.475 -1.8,-0.175 ; -1.8,-0.475 -1.5,-0.475 ; -1.8,-0.175 -1.5,-0.175 ; -1.8,0.175 -1.8,0.475 ; -1.8,0.175 -1.5,0.175 ; -1.8,0.475 -1.5,0.475 ; -1.8,0.825 -1.8,1.125 ; -1.8,0.825 -1.5,0.825 ; -1.8,1.125 -1.5,1.125 ; -1.5,-1.5 1.5,-1.5 ; -1.5,-1.5 -1.438,-1.438 ; -1.5,-1.5 -1.5,-1.125 ; -1.5,-1.125 -1.5,-0.825 ; -1.5,-0.825 -1.5,-0.475 ; -1.5,-0.475 -1.5,-0.175 ; -1.5,-0.175 -1.5,0.175 ; -1.5,0.175 -1.5,0.475 ; -1.5,0.475 -1.5,0.825 ; -1.5,0.825 -1.5,1.125 ; -1.5,1.125 -1.5,1.5 ; -1.5,1.5 1.5,1.5 ; -1.5,1.5 -1.438,1.438 ; -1.438,-1.438 1.438,-1.438 ; -1.438,-1.438 -1.438,1.438 ; -1.438,1.438 1.438,1.438 ; 1.438,-1.438 1.438,1.438 ; 1.438,-1.438 1.5,-1.5 ; 1.438,1.438 1.5,1.5 ; 1.5,-1.5 1.5,-1.125 ; 1.5,-1.125 1.8,-1.125 ; 1.5,-1.125 1.5,-0.825 ; 1.5,-0.825 1.8,-0.825 ; 1.5,-0.825 1.5,-0.475 ; 1.5,-0.475 1.8,-0.475 ; 1.5,-0.475 1.5,-0.175 ; 1.5,-0.175 1.5,0.175 ; 1.5,-0.175 1.8,-0.175 ; 1.5,0.175 1.8,0.175 ; 1.5,0.175 1.5,0.475 ; 1.5,0.475 1.8,0.475 ; 1.5,0.475 1.5,0.825 ; 1.5,0.825 1.8,0.825 ; 1.5,0.825 1.5,1.125 ; 1.5,1.125 1.8,1.125 ; 1.5,1.125 1.5,1.5 ; 1.8,-1.125 1.8,-0.825 ; 1.8,-1.125 2,-1.125 ; 1.8,-0.825 2,-0.825 ; 1.8,-0.475 1.8,-0.175 ; 1.8,-0.475 2,-0.475 ; 1.8,-0.175 2,-0.175 ; 1.8,0.175 1.8,0.475 ; 1.8,0.175 2,0.175 ; 1.8,0.475 2,0.475 ; 1.8,0.825 1.8,1.125 ; 1.8,0.825 2,0.825 ; 1.8,1.125 2,1.125 ; 2,-1.125 2.1,-1.125 ; 2,-1.125 2,-0.825 ; 2,-0.825 2.1,-0.825 ; 2,-0.475 2.1,-0.475 ; 2,-0.475 2,-0.175 ; 2,-0.175 2.1,-0.175 ; 2,0.175 2.1,0.175 ; 2,0.175 2,0.475 ; 2,0.475 2.1,0.475 ; 2,0.825 2.1,0.825 ; 2,0.825 2,1.125 ; 2,1.125 2.1,1.125 ; 2.1,-1.125 2.1,-0.825 ; 2.1,-1.125 2.5,-1.125 2.5,-0.825 2.1,-0.825 ; 2.1,-0.475 2.1,-0.175 ; 2.1,-0.475 2.5,-0.475 2.5,-0.175 2.1,-0.175 ; 2.1,0.175 2.1,0.475 ; 2.1,0.175 2.5,0.175 2.5,0.475 2.1,0.475 ; 2.1,0.825 2.1,1.125 ; 2.1,0.825 2.5,0.825 2.5,1.125 2.1,1.125
  text ".Designator" at -3.378,-0.339 h1.5
3D body "MSOP-86_HMC435A.x_t": height 0.93, standoff 0, extent -2.45,-1.5 2.45,1.5

## MTX2-183+ [mm] "Minicircuits QFN-12, body 3x4mm, putch 0.65mm"
height 0.9
pads (13):
  rect 0.3x1 smd mask+0.05: 1(-0.65,-1.55)
  oval 0.3x1 smd mask+0.05: 2(0,-1.55) 3(0.65,-1.55) 7(0.65,1.55) 8(0,1.55) 9(-0.65,1.55)
  oval 1x0.3 smd mask+0.05: 4(2.05,-0.65) 5(2.05,0) 6(2.05,0.65) 10(-2.05,0.65) 11(-2.05,0) 12(-2.05,-0.65)
  rect 2.45x1.45 smd mask+0.05: EP(0,0)
Top Overlay:
  circle w0.25: c-2.75,1.35 r0.125
  lines w0.2: -2.25,-1.1 -2.25,-1.75 -1.1,-1.75 ; -2.25,1.1 -2.25,1.75 -1.1,1.75 ; 1.1,-1.75 2.25,-1.75 2.25,-1.1 ; 1.1,1.75 2.25,1.75 2.25,1.1
Top Courtyard:
  lines w0.025: -2.75,-1 -2.75,1 -2.35,1 -2.35,1.85 -1,1.85 -1,2.25 1,2.25 1,1.85 2.35,1.85 2.35,1 2.75,1 2.75,-1 2.35,-1 2.35,-1.85 1,-1.85 1,-2.25 -1,-2.25 -1,-1.85 -2.35,-1.85 -2.35,-1 -2.75,-1
Top Assembly:
  circle w0.05: c-1.6,-1.1 r0.2
  lines w0.05: -2,-0.8 -2.02,-0.8 -2.02,-0.5 -2,-0.5 ; -2,-0.15 -2.02,-0.15 -2.02,0.15 -2,0.15 ; -2,0.5 -2.02,0.5 -2.02,0.8 -2,0.8 ; -0.8,-1.5 -0.8,-1.52 -0.5,-1.52 -0.5,-1.5 ; -0.8,1.5 -0.8,1.52 -0.5,1.52 -0.5,1.5 ; -0.15,-1.5 -0.15,-1.52 0.15,-1.52 0.15,-1.5 ; -0.15,1.5 -0.15,1.52 0.15,1.52 0.15,1.5 ; 0.5,-1.5 0.5,-1.52 0.8,-1.52 0.8,-1.5 ; 0.5,1.5 0.5,1.52 0.8,1.52 0.8,1.5 ; 2,-0.8 2.02,-0.8 2.02,-0.5 2,-0.5 ; 2,-0.15 2.02,-0.15 2.02,0.15 2,0.15 ; 2,0.5 2.02,0.5 2.02,0.8 2,0.8 ; -2,-1.5 2,-1.5 2,1.5 -2,1.5 -2,-1.5
  text ".Designator" at -4.511,-0.453 h2
3D body "MTX2-183+.x_t": height 0.92, standoff 0, extent -2.02,-1.52 2.02,1.52

## PBGA256_i350 [mm] "BGA, 256-Leads, Body 17,00x17,00mmx2,01mm, Pitch 1,00mm"
height 2.01
pads (256):
  round 0.45 smd mask+0.05: A1(-7.5,7.5) A2(-6.5,7.5) A3(-5.5,7.5) A4(-4.5,7.5) A5(-3.5,7.5) A6(-2.5,7.5) A7(-1.5,7.5) A8(-0.5,7.5) A9(0.5,7.5) A10(1.5,7.5) A11(2.5,7.5) A12(3.5,7.5) A13(4.5,7.5) A14(5.5,7.5) A15(6.5,7.5) A16(7.5,7.5) B1(-7.5,6.5) B2(-6.5,6.5) B3(-5.5,6.5) B4(-4.5,6.5) B5(-3.5,6.5) B6(-2.5,6.5) B7(-1.5,6.5) B8(-0.5,6.5) B9(0.5,6.5) B10(1.5,6.5) B11(2.5,6.5) B12(3.5,6.5) B13(4.5,6.5) B14(5.5,6.5) B15(6.5,6.5) B16(7.5,6.5) C1(-7.5,5.5) C2(-6.5,5.5) C3(-5.5,5.5) C4(-4.5,5.5) C5(-3.5,5.5) C6(-2.5,5.5) C7(-1.5,5.5) C8(-0.5,5.5) C9(0.5,5.5) C10(1.5,5.5) C11(2.5,5.5) C12(3.5,5.5) C13(4.5,5.5) C14(5.5,5.5) C15(6.5,5.5) C16(7.5,5.5) D1(-7.5,4.5) D2(-6.5,4.5) D3(-5.5,4.5) D4(-4.5,4.5) D5(-3.5,4.5) D6(-2.5,4.5) D7(-1.5,4.5) D8(-0.5,4.5) D9(0.5,4.5) D10(1.5,4.5) D11(2.5,4.5) D12(3.5,4.5) D13(4.5,4.5) D14(5.5,4.5) D15(6.5,4.5) D16(7.5,4.5) E1(-7.5,3.5) E2(-6.5,3.5) E3(-5.5,3.5) E4(-4.5,3.5) E5(-3.5,3.5) E6(-2.5,3.5) E7(-1.5,3.5) E8(-0.5,3.5) E9(0.5,3.5) E10(1.5,3.5) E11(2.5,3.5) E12(3.5,3.5) E13(4.5,3.5) E14(5.5,3.5) E15(6.5,3.5) E16(7.5,3.5) F1(-7.5,2.5) F2(-6.5,2.5) F3(-5.5,2.5) F4(-4.5,2.5) F5(-3.5,2.5) F6(-2.5,2.5) F7(-1.5,2.5) F8(-0.5,2.5) F9(0.5,2.5) F10(1.5,2.5) F11(2.5,2.5) F12(3.5,2.5) F13(4.5,2.5) F14(5.5,2.5) F15(6.5,2.5) F16(7.5,2.5) G1(-7.5,1.5) G2(-6.5,1.5) G3(-5.5,1.5) G4(-4.5,1.5) G5(-3.5,1.5) G6(-2.5,1.5) G7(-1.5,1.5) G8(-0.5,1.5) G9(0.5,1.5) G10(1.5,1.5) G11(2.5,1.5) G12(3.5,1.5) G13(4.5,1.5) G14(5.5,1.5) G15(6.5,1.5) G16(7.5,1.5) H1(-7.5,0.5) H2(-6.5,0.5) H3(-5.5,0.5) H4(-4.5,0.5) H5(-3.5,0.5) H6(-2.5,0.5) H7(-1.5,0.5) H8(-0.5,0.5) H9(0.5,0.5) H10(1.5,0.5) H11(2.5,0.5) H12(3.5,0.5) H13(4.5,0.5) H14(5.5,0.5) H15(6.5,0.5) H16(7.5,0.5) J1(-7.5,-0.5) J2(-6.5,-0.5) J3(-5.5,-0.5) J4(-4.5,-0.5) J5(-3.5,-0.5) J6(-2.5,-0.5) J7(-1.5,-0.5) J8(-0.5,-0.5) J9(0.5,-0.5) J10(1.5,-0.5) J11(2.5,-0.5) J12(3.5,-0.5) J13(4.5,-0.5) J14(5.5,-0.5) J15(6.5,-0.5) J16(7.5,-0.5) K1(-7.5,-1.5) K2(-6.5,-1.5) K3(-5.5,-1.5) K4(-4.5,-1.5) K5(-3.5,-1.5) K6(-2.5,-1.5) K7(-1.5,-1.5) K8(-0.5,-1.5) K9(0.5,-1.5) K10(1.5,-1.5) K11(2.5,-1.5) K12(3.5,-1.5) K13(4.5,-1.5) K14(5.5,-1.5) K15(6.5,-1.5) K16(7.5,-1.5) L1(-7.5,-2.5) L2(-6.5,-2.5) L3(-5.5,-2.5) L4(-4.5,-2.5) L5(-3.5,-2.5) L6(-2.5,-2.5) L7(-1.5,-2.5) L8(-0.5,-2.5) L9(0.5,-2.5) L10(1.5,-2.5) L11(2.5,-2.5) L12(3.5,-2.5) L13(4.5,-2.5) L14(5.5,-2.5) L15(6.5,-2.5) L16(7.5,-2.5) M1(-7.5,-3.5) M2(-6.5,-3.5) M3(-5.5,-3.5) M4(-4.5,-3.5) M5(-3.5,-3.5) M6(-2.5,-3.5) M7(-1.5,-3.5) M8(-0.5,-3.5) M9(0.5,-3.5) M10(1.5,-3.5) M11(2.5,-3.5) M12(3.5,-3.5) M13(4.5,-3.5) M14(5.5,-3.5) M15(6.5,-3.5) M16(7.5,-3.5) N1(-7.5,-4.5) N2(-6.5,-4.5) N3(-5.5,-4.5) N4(-4.5,-4.5) N5(-3.5,-4.5) N6(-2.5,-4.5) N7(-1.5,-4.5) N8(-0.5,-4.5) N9(0.5,-4.5) N10(1.5,-4.5) N11(2.5,-4.5) N12(3.5,-4.5) N13(4.5,-4.5) N14(5.5,-4.5) N15(6.5,-4.5) N16(7.5,-4.5) P1(-7.5,-5.5) P2(-6.5,-5.5) P3(-5.5,-5.5) P4(-4.5,-5.5) P5(-3.5,-5.5) P6(-2.5,-5.5) P7(-1.5,-5.5) P8(-0.5,-5.5) P9(0.5,-5.5) P10(1.5,-5.5) P11(2.5,-5.5) P12(3.5,-5.5) P13(4.5,-5.5) P14(5.5,-5.5) P15(6.5,-5.5) P16(7.5,-5.5) R1(-7.5,-6.5) R2(-6.5,-6.5) R3(-5.5,-6.5) R4(-4.5,-6.5) R5(-3.5,-6.5) R6(-2.5,-6.5) R7(-1.5,-6.5) R8(-0.5,-6.5) R9(0.5,-6.5) R10(1.5,-6.5) R11(2.5,-6.5) R12(3.5,-6.5) R13(4.5,-6.5) R14(5.5,-6.5) R15(6.5,-6.5) R16(7.5,-6.5) T1(-7.5,-7.5) T2(-6.5,-7.5) T3(-5.5,-7.5) T4(-4.5,-7.5) T5(-3.5,-7.5) T6(-2.5,-7.5) T7(-1.5,-7.5) T8(-0.5,-7.5) T9(0.5,-7.5) T10(1.5,-7.5) T11(2.5,-7.5) T12(3.5,-7.5) T13(4.5,-7.5) T14(5.5,-7.5) T15(6.5,-7.5) T16(7.5,-7.5)
Top Overlay:
  circle w0.25: c-9.15,8.3 r0.125
  region: -7.5,8.5 -8.5,7.5 -8.5,8.5
  lines w0.2: -8.5,-7.125 ccw(c-8.5,-7) -8.5,-6.875 ; -8.5,6.875 ccw(c-8.5,7) -8.5,7.125 ; -8.5,7.5 -7.5,8.5 ; -7.125,-8.5 cw(c-7,-8.5) -6.875,-8.5 ; -7.125,8.5 ccw(c-7,8.5) -6.875,8.5 ; 6.875,-8.5 cw(c7,-8.5) 7.125,-8.5 ; 6.875,8.5 ccw(c7,8.5) 7.125,8.5 ; 8.5,-7.125 cw(c8.5,-7) 8.5,-6.875 ; 8.5,6.875 cw(c8.5,7) 8.5,7.125 ; -8.5,-8.5 8.5,-8.5 8.5,8.5 -8.5,8.5 -8.5,-8.5
Top Courtyard:
  lines w0.05: -9.5,-9.5 9.5,-9.5 9.5,9.5 -9.5,9.5 -9.5,-9.5
Top Assembly:
  circle w0.05: c-5.5,5.5 r0.75
  lines w0.05: -8.5,7.512 -7.246,6.539 ; -7.8,8.5 -6.539,7.246 ; -7.5,-5.926 ccw(c-6.64,-5.929) -7.246,-6.539 ; -7.5,-5.926 -7.5,5.926 ; -7.5,-5.926 -7.067,-5.747 ; -7.5,5.926 cw(c-6.64,5.929) -7.246,6.539 ; -7.5,5.926 -7.067,5.747 ; -7.246,-6.539 -6.539,-7.246 ; -7.246,-6.539 -6.813,-6.359 ; -7.246,6.539 -6.539,7.246 ; -7.246,6.539 -6.813,6.359 ; -7.067,-5.747 ccw(c-6.161,-5.73) -6.813,-6.359 ; -7.067,-5.747 -7.067,5.747 ; -7.067,-5.747 -6.894,-5.747 ; -7.067,5.747 cw(c-6.161,5.73) -6.813,6.359 ; -7.067,5.747 -6.894,5.747 ; -6.894,-5.747 ccw(c-6.206,-5.749) -6.691,-6.237 ; -6.894,-5.747 -6.894,5.747 ; -6.894,5.747 cw(c-6.206,5.749) -6.691,6.237 ; -6.813,-6.359 -6.359,-6.813 ; -6.813,-6.359 -6.691,-6.237 ; -6.813,6.359 -6.691,6.237 ; -6.813,6.359 -6.359,6.813 ; -6.691,-6.237 -6.237,-6.691 ; -6.691,6.237 -6.237,6.691 ; -6.539,-7.246 ccw(c-5.929,-6.64) -5.926,-7.5 ; -6.539,-7.246 -6.359,-6.813 ; -6.539,7.246 cw(c-5.929,6.64) -5.926,7.5 ; -6.539,7.246 -6.359,6.813 ; -6.359,-6.813 ccw(c-5.73,-6.161) -5.747,-7.067 ; -6.359,-6.813 -6.237,-6.691 ; -6.359,6.813 cw(c-5.73,6.161) -5.747,7.067 ; -6.359,6.813 -6.237,6.691 ; -6.237,-6.691 ccw(c-5.749,-6.206) -5.747,-6.894 ; -6.237,6.691 cw(c-5.749,6.206) -5.747,6.894 ; -5.926,-7.5 5.926,-7.5 ; -5.926,-7.5 -5.747,-7.067 ; -5.926,7.5 5.926,7.5 ; -5.926,7.5 -5.747,7.067 ; -5.747,-7.067 5.747,-7.067 ; -5.747,-7.067 -5.747,-6.894 ; -5.747,-6.894 5.747,-6.894 ; -5.747,6.894 -5.747,7.067 ; -5.747,6.894 5.747,6.894 ; -5.747,7.067 5.747,7.067 ; 5.747,-7.067 ccw(c5.73,-6.161) 6.359,-6.813 ; 5.747,-7.067 5.926,-7.5 ; 5.747,-7.067 5.747,-6.894 ; 5.747,-6.894 ccw(c5.749,-6.206) 6.237,-6.691 ; 5.747,6.894 cw(c5.749,6.206) 6.237,6.691 ; 5.747,6.894 5.747,7.067 ; 5.747,7.067 cw(c5.73,6.161) 6.359,6.813 ; 5.747,7.067 5.926,7.5 ; 5.926,-7.5 ccw(c5.929,-6.64) 6.539,-7.246 ; 5.926,7.5 cw(c5.929,6.64) 6.539,7.246 ; 6.237,-6.691 6.359,-6.813 ; 6.237,-6.691 6.691,-6.237 ; 6.237,6.691 6.691,6.237 ; 6.237,6.691 6.359,6.813 ; 6.359,-6.813 6.539,-7.246 ; 6.359,-6.813 6.813,-6.359 ; 6.359,6.813 6.539,7.246 ; 6.359,6.813 6.813,6.359 ; 6.539,-7.246 7.246,-6.539 ; 6.539,7.246 7.246,6.539 ; 6.691,-6.237 ccw(c6.206,-5.749) 6.894,-5.747 ; 6.691,-6.237 6.813,-6.359 ; 6.691,6.237 cw(c6.206,5.749) 6.894,5.747 ; 6.691,6.237 6.813,6.359 ; 6.813,-6.359 ccw(c6.161,-5.73) 7.067,-5.747 ; 6.813,-6.359 7.246,-6.539 ; 6.813,6.359 cw(c6.161,5.73) 7.067,5.747 ; 6.813,6.359 7.246,6.539 ; 6.894,-5.747 7.067,-5.747 ; 6.894,-5.747 6.894,5.747 ; 6.894,5.747 7.067,5.747 ; 7.067,-5.747 7.5,-5.926 ; 7.067,-5.747 7.067,5.747 ; 7.067,5.747 7.5,5.926 ; 7.246,-6.539 ccw(c6.64,-5.929) 7.5,-5.926 ; 7.246,6.539 cw(c6.64,5.929) 7.5,5.926 ; 7.5,-5.926 7.5,5.926 ; -8.5,-8.5 -8.5,-7.25 ccw(c-8.5,-7) -8.5,-6.75 -8.5,6.75 ccw(c-8.5,7) -8.5,7.25 -8.5,8.5 -7.25,8.5 ccw(c-7,8.5) -6.75,8.5 6.75,8.5 ccw(c7,8.5) 7.25,8.5 8.5,8.5 8.5,7.25 ccw(c8.5,7) 8.5,6.75 8.5,-6.75 ccw(c8.5,-7) 8.5,-7.25 8.5,-8.5 7.25,-8.5 ccw(c7,-8.5) 6.75,-8.5 -6.75,-8.5 ccw(c-7,-8.5) -7.25,-8.5 -8.5,-8.5
  text ".Designator" at -9.021,-0.905 h4
3D body "PBGA256_i350.x_t": height 1.73, standoff -0.03, extent -8.5,-8.5 8.5,8.5

## PQFN16_MAAV011013 [mm]
height 0.9
pads (17):
  rect 0.6x0.25 smd mask+0.05: 1(-1.35,0.75) 2(-1.35,0.25) 3(-1.35,-0.25) 4(-1.35,-0.75) 9(1.35,-0.75) 10(1.35,-0.25) 11(1.35,0.25) 12(1.35,0.75)
  rect 0.25x0.6 smd mask+0.05: 5(-0.75,-1.35) 6(-0.25,-1.35) 7(0.25,-1.35) 8(0.75,-1.35) 13(0.75,1.35) 14(0.25,1.35) 15(-0.25,1.35) 16(-0.75,1.35)
  rect 1.7x1.7 smd paste-10 mask+0.06: EP(0,0)
Top Overlay:
  circle w0.25: c-2.175,1.45 r0.125
  lines w0.2: -1.65,-1.25 -1.65,-1.65 -1.25,-1.65 ; -1.65,1.25 -1.65,1.65 -1.25,1.65 ; 1.25,-1.65 1.65,-1.65 1.65,-1.25 ; 1.25,1.65 1.65,1.65 1.65,1.25
Top Paste:
  region: 0.425,0.425 0.425,0.825 0.825,0.825 0.825,0.425
  region: 0.425,-0.425 0.425,-0.825 0.825,-0.825 0.825,-0.425
  region: 0.425,-0.225 0.825,-0.225 0.825,0.225 0.425,0.225
  region: -0.425,-0.425 -0.425,-0.825 -0.825,-0.825 -0.825,-0.425
  region: -0.425,0.425 -0.425,0.825 -0.825,0.825 -0.825,0.425
  region: 0.225,-0.425 0.225,-0.825 -0.225,-0.825 -0.225,-0.425
  region: 0.225,0.425 0.225,0.825 -0.225,0.825 -0.225,0.425
  region: -0.425,-0.225 -0.825,-0.225 -0.825,0.225 -0.425,0.225
  region: 0.225,-0.225 -0.225,-0.225 -0.225,0.225 0.225,0.225
Top Courtyard:
  lines w0.025: -2.15,-1.15 -2.15,1.15 -1.7,1.15 -1.7,1.7 -1.15,1.7 -1.15,2.15 1.15,2.15 1.15,1.7 1.7,1.7 1.7,1.15 2.15,1.15 2.15,-1.15 1.7,-1.15 1.7,-1.7 1.15,-1.7 1.15,-2.15 -1.15,-2.15 -1.15,-1.7 -1.7,-1.7 -1.7,-1.15 -2.15,-1.15
Top Assembly:
  circle w0.05: c-1.1,1.1 r0.2
  lines w0.05: -1.5,-0.875 -1.52,-0.875 -1.52,-0.625 -1.5,-0.625 ; -1.5,-0.375 -1.52,-0.375 -1.52,-0.125 -1.5,-0.125 ; -1.5,0.125 -1.52,0.125 -1.52,0.375 -1.5,0.375 ; -1.5,0.625 -1.52,0.625 -1.52,0.875 -1.5,0.875 ; -0.875,-1.5 -0.875,-1.52 -0.625,-1.52 -0.625,-1.5 ; -0.875,1.5 -0.875,1.52 -0.625,1.52 -0.625,1.5 ; -0.375,-1.5 -0.375,-1.52 -0.125,-1.52 -0.125,-1.5 ; -0.375,1.5 -0.375,1.52 -0.125,1.52 -0.125,1.5 ; 0.125,-1.5 0.125,-1.52 0.375,-1.52 0.375,-1.5 ; 0.125,1.5 0.125,1.52 0.375,1.52 0.375,1.5 ; 0.625,-1.5 0.625,-1.52 0.875,-1.52 0.875,-1.5 ; 0.625,1.5 0.625,1.52 0.875,1.52 0.875,1.5 ; 1.5,-0.875 1.52,-0.875 1.52,-0.625 1.5,-0.625 ; 1.5,-0.375 1.52,-0.375 1.52,-0.125 1.5,-0.125 ; 1.5,0.125 1.52,0.125 1.52,0.375 1.5,0.375 ; 1.5,0.625 1.52,0.625 1.52,0.875 1.5,0.875 ; -1.5,-1.5 -1.5,1.5 1.5,1.5 1.5,-1.5 -1.5,-1.5
  text ".Designator" at -2.815,-0.283 h1.25
3D body "MAAV-011013.x_t": height 0.9, standoff -0.02, extent -1.52,-1.52 1.52,1.52

## PQFN24_XX1002 [mm] "QFN, 24-Leads, Body 4x4mm, Pitch 0.50mm, Thermal Pad 2.6x2.6mm"
height 0.9
pads (25):
  rect 0.6x0.25 smd mask+0.05: 1(-1.9,1.25)
  rrect50% 0.6x0.25 smd mask+0.05: 2(-1.9,0.75) 3(-1.9,0.25) 4(-1.9,-0.25) 5(-1.9,-0.75) 6(-1.9,-1.25) 13(1.9,-1.25) 14(1.9,-0.75) 15(1.9,-0.25) 16(1.9,0.25) 17(1.9,0.75) 18(1.9,1.25)
  rrect50% 0.25x0.6 smd mask+0.05: 7(-1.25,-1.9) 8(-0.75,-1.9) 9(-0.25,-1.9) 10(0.25,-1.9) 11(0.75,-1.9) 12(1.25,-1.9) 19(1.25,1.9) 20(0.75,1.9) 21(0.25,1.9) 22(-0.25,1.9) 23(-0.75,1.9) 24(-1.25,1.9)
  rect 2.7x2.7 smd paste-5 mask+0.05: EP(0,0)
Top Overlay:
  circle w0.25: c-2.65,2.05 r0.1
  lines w0.2: -2.22,-1.775 -2.22,-2.23 -1.775,-2.23 ; -2.22,1.775 -2.22,2.23 -1.775,2.23 ; 1.775,-2.23 2.22,-2.23 2.22,-1.775 ; 1.775,2.23 2.22,2.23 2.22,1.775
Top Paste:
  rectangle: -0.3,0.6 0.3,1.2
  rectangle: -1.2,0.6 -0.6,1.2
  rectangle: -0.3,-0.3 0.3,0.3
  rectangle: -1.2,-0.3 -0.6,0.3
  region: 1.2,1.2 0.6,1.2 0.6,0.6 1.2,0.6
  region: 1.2,0.3 0.6,0.3 0.6,-0.3 1.2,-0.3
  rectangle: -0.3,-1.2 0.3,-0.6
  rectangle: -1.2,-1.2 -0.6,-0.6
  region: 1.2,-0.6 0.6,-0.6 0.6,-1.2 1.2,-1.2
Top Courtyard:
  lines w0.025: -2.5,-1.65 -2.25,-1.65 -2.25,-2.25 -1.65,-2.25 -1.65,-2.5 1.65,-2.5 1.65,-2.25 2.25,-2.25 2.25,-1.65 2.5,-1.65 2.5,1.65 2.25,1.65 2.25,2.25 1.65,2.25 1.65,2.5 -1.65,2.5 -1.65,2.25 -2.25,2.25 -2.25,1.65 -2.5,1.65 -2.5,-1.65
Top Assembly:
  circle w0.05: c-1.55,1.55 r0.225
  lines w0.05: -2,-1.375 -2.02,-1.375 -2.02,-1.125 -2,-1.125 ; -2,-0.875 -2.02,-0.875 -2.02,-0.625 -2,-0.625 ; -2,-0.375 -2.02,-0.375 -2.02,-0.125 -2,-0.125 ; -2,0.125 -2.02,0.125 -2.02,0.375 -2,0.375 ; -2,0.625 -2.02,0.625 -2.02,0.875 -2,0.875 ; -2,1.125 -2.02,1.125 -2.02,1.375 -2,1.375 ; -1.375,-2 -1.375,-2.02 -1.125,-2.02 -1.125,-2 ; -1.375,2 -1.375,2.02 -1.125,2.02 -1.125,2 ; -0.875,-2 -0.875,-2.02 -0.625,-2.02 -0.625,-2 ; -0.875,2 -0.875,2.02 -0.625,2.02 -0.625,2 ; -0.375,-2 -0.375,-2.02 -0.125,-2.02 -0.125,-2 ; -0.375,2 -0.375,2.02 -0.125,2.02 -0.125,2 ; 0.125,-2 0.125,-2.02 0.375,-2.02 0.375,-2 ; 0.125,2 0.125,2.02 0.375,2.02 0.375,2 ; 0.625,-2 0.625,-2.02 0.875,-2.02 0.875,-2 ; 0.625,2 0.625,2.02 0.875,2.02 0.875,2 ; 1.125,-2 1.125,-2.02 1.375,-2.02 1.375,-2 ; 1.125,2 1.125,2.02 1.375,2.02 1.375,2 ; 2,-1.375 2.02,-1.375 2.02,-1.125 2,-1.125 ; 2,-0.875 2.02,-0.875 2.02,-0.625 2,-0.625 ; 2,-0.375 2.02,-0.375 2.02,-0.125 2,-0.125 ; 2,0.125 2.02,0.125 2.02,0.375 2,0.375 ; 2,0.625 2.02,0.625 2.02,0.875 2,0.875 ; 2,1.125 2.02,1.125 2.02,1.375 2,1.375 ; -2,-2 2,-2 2,2 -2,2 -2,-2
  text ".Designator" at -4.511,-0.453 h2
3D body "PQFN24_XX1002.x_t": height 0.92, standoff 0, extent -2.02,-2.02 2.02,2.02

## PQFP64_TFP410PAP [mm] "PQFP, 64-Leads, Body 10.00x10.00mm, Pitch 0.50mm, Power Pad 5.00x5.00mm"
height 1
pads (65):
  rect 0.3x1.5 smd paste+0 mask+0.05: 1(-3.75,-5.7)
  oval 0.3x1.5 smd paste+0 mask+0.05: 2(-3.25,-5.7) 3(-2.75,-5.7) 4(-2.25,-5.7) 5(-1.75,-5.7) 6(-1.25,-5.7) 7(-0.75,-5.7) 8(-0.25,-5.7) 9(0.25,-5.7) 10(0.75,-5.7) 11(1.25,-5.7) 12(1.75,-5.7) 13(2.25,-5.7) 14(2.75,-5.7) 15(3.25,-5.7) 16(3.75,-5.7) 33(3.75,5.7) 34(3.25,5.7) 35(2.75,5.7) 36(2.25,5.7) 37(1.75,5.7) 38(1.25,5.7) 39(0.75,5.7) 40(0.25,5.7) 41(-0.25,5.7) 42(-0.75,5.7) 43(-1.25,5.7) 44(-1.75,5.7) 45(-2.25,5.7) 46(-2.75,5.7) 47(-3.25,5.7) 48(-3.75,5.7)
  oval 1.5x0.3 smd paste+0 mask+0.05: 17(5.7,-3.75) 18(5.7,-3.25) 19(5.7,-2.75) 20(5.7,-2.25) 21(5.7,-1.75) 22(5.7,-1.25) 23(5.7,-0.75) 24(5.7,-0.25) 25(5.7,0.25) 26(5.7,0.75) 27(5.7,1.25) 28(5.7,1.75) 29(5.7,2.25) 30(5.7,2.75) 31(5.7,3.25) 32(5.7,3.75) 49(-5.7,3.75) 50(-5.7,3.25) 51(-5.7,2.75) 52(-5.7,2.25) 53(-5.7,1.75) 54(-5.7,1.25) 55(-5.7,0.75) 56(-5.7,0.25) 57(-5.7,-0.25) 58(-5.7,-0.75) 59(-5.7,-1.25) 60(-5.7,-1.75) 61(-5.7,-2.25) 62(-5.7,-2.75) 63(-5.7,-3.25) 64(-5.7,-3.75)
  rect 8x8 smd paste-5 mask-1.5: EP(0,0)
Top Overlay:
  circle w0.25: c-4.5,-6.125 r0.125
  region: -4.2,-5.25 -4.2,-4.2 -5.25,-4.2 -5.25,-5.25
  region: -4.75,5.25 -5.25,4.75 -5.25,5.25
  region: 4.75,5.25 5.25,4.75 5.25,5.25
  region: 4.75,-5.25 5.25,-4.75 5.25,-5.25
  lines w0.2: -5.25,4.25 -5.25,5.25 -4.25,5.25 ; 4.25,-5.25 5.25,-5.25 5.25,-4.25 ; 4.25,5.25 5.25,5.25 5.25,4.25
Top Paste:
  rectangle: 2.75,2.75 3.75,3.75
  rectangle: 1.45,2.75 2.45,3.75
  rectangle: 0.15,2.75 1.15,3.75
  rectangle: -3.75,2.75 -2.75,3.75
  rectangle: -2.45,2.75 -1.45,3.75
  rectangle: -1.15,2.75 -0.15,3.75
  rectangle: 2.75,1.45 3.75,2.45
  rectangle: 1.45,1.45 2.45,2.45
  rectangle: 0.15,1.45 1.15,2.45
  rectangle: -3.75,1.45 -2.75,2.45
  rectangle: -2.45,1.45 -1.45,2.45
  rectangle: -1.15,1.45 -0.15,2.45
  rectangle: 2.75,-3.75 3.75,-2.75
  rectangle: 1.45,-3.75 2.45,-2.75
  rectangle: 0.15,-3.75 1.15,-2.75
  rectangle: -3.75,-3.75 -2.75,-2.75
  rectangle: -2.45,-3.75 -1.45,-2.75
  rectangle: -1.15,-3.75 -0.15,-2.75
  rectangle: 2.75,-2.45 3.75,-1.45
  rectangle: 1.45,-2.45 2.45,-1.45
  rectangle: 0.15,-2.45 1.15,-1.45
  rectangle: -3.75,-2.45 -2.75,-1.45
  rectangle: -2.45,-2.45 -1.45,-1.45
  rectangle: -1.15,-2.45 -0.15,-1.45
  rectangle: 2.75,-1.15 3.75,-0.15
  rectangle: 1.45,-1.15 2.45,-0.15
  rectangle: 0.15,-1.15 1.15,-0.15
  rectangle: -3.75,-1.15 -2.75,-0.15
  rectangle: -2.45,-1.15 -1.45,-0.15
  rectangle: -1.15,-1.15 -0.15,-0.15
  rectangle: 2.75,0.15 3.75,1.15
  rectangle: 1.45,0.15 2.45,1.15
  rectangle: -3.75,0.15 -2.75,1.15
  rectangle: -2.45,0.15 -1.45,1.15
  rectangle: -1.15,0.15 -0.15,1.15
  rectangle: 0.15,0.15 1.15,1.15
Top Courtyard:
  lines w0.025: -6.7,-4.15 -6.7,4.15 -5.25,4.15 -5.25,5.25 -4.15,5.25 -4.15,6.7 4.15,6.7 4.15,5.25 5.25,5.25 5.25,4.15 6.7,4.15 6.7,-4.15 5.25,-4.15 5.25,-5.25 4.15,-5.25 4.15,-6.7 -4.15,-6.7 -4.15,-5.25 -5.25,-5.25 -5.25,-4.15 -6.7,-4.15
Top Assembly:
  drawing of 473 lines, arcs and shapes, not listed
  text ".Designator" at -4.511,-0.453 h2
3D body "TFP410PAP(S-PQFP-G64).x_t": height 1.1, standoff 0, extent -6,-6 6,6

## PQFP100_TFP401 [mm] "PQFP, 100-Leads, Body 14,00x14,00mm, Pitch 0,50mm"
height 1.6
pads (101):
  rect 1.6x0.3 smd paste+0 mask+0.05: 1(-7.6,6)
  oval 1.6x0.3 smd paste+0 mask+0.05: 2(-7.6,5.5) 3(-7.6,5) 4(-7.6,4.5) 5(-7.6,4) 6(-7.6,3.5) 7(-7.6,3) 8(-7.6,2.5) 9(-7.6,2) 10(-7.6,1.5) 11(-7.6,1) 12(-7.6,0.5) 13(-7.6,0) 14(-7.6,-0.5) 15(-7.6,-1) 16(-7.6,-1.5) 17(-7.6,-2) 18(-7.6,-2.5) 19(-7.6,-3) 20(-7.6,-3.5) 21(-7.6,-4) 22(-7.6,-4.5) 23(-7.6,-5) 24(-7.6,-5.5) 25(-7.6,-6) 51(7.6,-6) 52(7.6,-5.5) 53(7.6,-5) 54(7.6,-4.5) 55(7.6,-4) 56(7.6,-3.5) 57(7.6,-3) 58(7.6,-2.5) 59(7.6,-2) 60(7.6,-1.5) 61(7.6,-1) 62(7.6,-0.5) 63(7.6,0) 64(7.6,0.5) 65(7.6,1) 66(7.6,1.5) 67(7.6,2) 68(7.6,2.5) 69(7.6,3) 70(7.6,3.5) 71(7.6,4) 72(7.6,4.5) 73(7.6,5) 74(7.6,5.5) 75(7.6,6)
  oval 0.3x1.6 smd paste+0 mask+0.05: 26(-6,-7.6) 27(-5.5,-7.6) 28(-5,-7.6) 29(-4.5,-7.6) 30(-4,-7.6) 31(-3.5,-7.6) 32(-3,-7.6) 33(-2.5,-7.6) 34(-2,-7.6) 35(-1.5,-7.6) 36(-1,-7.6) 37(-0.5,-7.6) 38(0,-7.6) 39(0.5,-7.6) 40(1,-7.6) 41(1.5,-7.6) 42(2,-7.6) 43(2.5,-7.6) 44(3,-7.6) 45(3.5,-7.6) 46(4,-7.6) 47(4.5,-7.6) 48(5,-7.6) 49(5.5,-7.6) 50(6,-7.6) 76(6,7.6) 77(5.5,7.6) 78(5,7.6) 79(4.5,7.6) 80(4,7.6) 81(3.5,7.6) 82(3,7.6) 83(2.5,7.6) 84(2,7.6) 85(1.5,7.6) 86(1,7.6) 87(0.5,7.6) 88(0,7.6) 89(-0.5,7.6) 90(-1,7.6) 91(-1.5,7.6) 92(-2,7.6) 93(-2.5,7.6) 94(-3,7.6) 95(-3.5,7.6) 96(-4,7.6) 97(-4.5,7.6) 98(-5,7.6) 99(-5.5,7.6) 100(-6,7.6)
  rrect10% 6x6 smd paste-50 mask+0.05: EP(0,0)
Top Overlay:
  circle w0.6: c-5.85,5.85 r0.2
  circle w0.25: c-8.125,6.75 r0.125
  lines w0.2: -9.75,-6 -8.75,-6 ; -9.75,-3.5 -8.75,-3.5 ; -9.75,-1 -8.75,-1 ; -9.75,1.5 -8.75,1.5 ; -9.75,4 -8.75,4 ; -9.75,6 -8.75,6 ; -7.15,-6.55 -7.15,-7.15 -6.525,-7.15 ; -7.15,6.525 -7.15,7.15 -6.55,7.15 ; -6,-9.75 -6,-8.75 ; -6,8.75 -6,9.75 ; -4,-9.75 -4,-8.75 ; -3.5,8.75 -3.5,9.75 ; -1.5,-9.75 -1.5,-8.75 ; -1,8.75 -1,9.75 ; 1,-9.75 1,-8.75 ; 1.5,8.75 1.5,9.75 ; 3.5,-9.75 3.5,-8.75 ; 3.5,8.75 3.5,9.75 ; 6,-9.75 6,-8.75 ; 6,8.75 6,9.75 ; 6.525,7.15 7.15,7.15 7.15,6.55 ; 6.55,-7.15 7.15,-7.15 7.15,-6.525 ; 8.75,-6 9.75,-6 ; 8.75,-4 9.75,-4 ; 8.75,-1.5 9.75,-1.5 ; 8.75,1 9.75,1 ; 8.75,3.5 9.75,3.5 ; 8.75,6 9.75,6
Top Paste:
  rectangle: 0.1,-0.7 0.7,-0.1
  rectangle: -0.7,-0.7 -0.1,-0.1
  region: -0.1,0.7 -0.7,0.7 -0.7,0.1 -0.1,0.1
  region: 0.7,0.7 0.1,0.7 0.1,0.1 0.7,0.1
  rectangle: 1.7,-0.7 2.3,-0.1
  rectangle: 0.9,-0.7 1.5,-0.1
  region: 1.5,0.7 0.9,0.7 0.9,0.1 1.5,0.1
  region: 2.3,0.7 1.7,0.7 1.7,0.1 2.3,0.1
  rectangle: 2.5,-0.7 3.1,-0.1
  region: 3.1,0.7 2.5,0.7 2.5,0.1 3.1,0.1
  region: -1.7,0.7 -2.3,0.7 -2.3,0.1 -1.7,0.1
  region: -0.9,0.7 -1.5,0.7 -1.5,0.1 -0.9,0.1
  rectangle: -1.5,-0.7 -0.9,-0.1
  rectangle: -2.3,-0.7 -1.7,-0.1
  region: -2.5,0.7 -3.1,0.7 -3.1,0.1 -2.5,0.1
  rectangle: -3.1,-0.7 -2.5,-0.1
  region: -0.1,1.5 -0.7,1.5 -0.7,0.9 -0.1,0.9
  region: 0.7,1.5 0.1,1.5 0.1,0.9 0.7,0.9
  region: 1.5,1.5 0.9,1.5 0.9,0.9 1.5,0.9
  region: 2.3,1.5 1.7,1.5 1.7,0.9 2.3,0.9
  region: 3.1,1.5 2.5,1.5 2.5,0.9 3.1,0.9
  region: -1.7,1.5 -2.3,1.5 -2.3,0.9 -1.7,0.9
  region: -0.9,1.5 -1.5,1.5 -1.5,0.9 -0.9,0.9
  region: -2.5,1.5 -3.1,1.5 -3.1,0.9 -2.5,0.9
  region: -0.1,2.3 -0.7,2.3 -0.7,1.7 -0.1,1.7
  region: 0.7,2.3 0.1,2.3 0.1,1.7 0.7,1.7
  region: 1.5,2.3 0.9,2.3 0.9,1.7 1.5,1.7
  region: 2.3,2.3 1.7,2.3 1.7,1.7 2.3,1.7
  region: 3.1,2.3 2.5,2.3 2.5,1.7 3.1,1.7
  region: -1.7,2.3 -2.3,2.3 -2.3,1.7 -1.7,1.7
  region: -0.9,2.3 -1.5,2.3 -1.5,1.7 -0.9,1.7
  region: -2.5,2.3 -3.1,2.3 -3.1,1.7 -2.5,1.7
  region: -0.1,3.1 -0.7,3.1 -0.7,2.5 -0.1,2.5
  region: 0.7,3.1 0.1,3.1 0.1,2.5 0.7,2.5
  region: 1.5,3.1 0.9,3.1 0.9,2.5 1.5,2.5
  region: 2.3,3.1 1.7,3.1 1.7,2.5 2.3,2.5
  region: 3.1,3.1 2.5,3.1 2.5,2.5 3.1,2.5
  region: -1.7,3.1 -2.3,3.1 -2.3,2.5 -1.7,2.5
  region: -0.9,3.1 -1.5,3.1 -1.5,2.5 -0.9,2.5
  region: -2.5,3.1 -3.1,3.1 -3.1,2.5 -2.5,2.5
  rectangle: 0.1,-1.5 0.7,-0.9
  rectangle: -0.7,-1.5 -0.1,-0.9
  rectangle: -1.5,-1.5 -0.9,-0.9
  rectangle: -2.3,-1.5 -1.7,-0.9
  rectangle: -3.1,-1.5 -2.5,-0.9
  rectangle: 1.7,-1.5 2.3,-0.9
  rectangle: 0.9,-1.5 1.5,-0.9
  rectangle: 2.5,-1.5 3.1,-0.9
  rectangle: 0.1,-2.3 0.7,-1.7
  rectangle: -0.7,-2.3 -0.1,-1.7
  rectangle: -1.5,-2.3 -0.9,-1.7
  rectangle: -2.3,-2.3 -1.7,-1.7
  rectangle: -3.1,-2.3 -2.5,-1.7
  rectangle: 1.7,-2.3 2.3,-1.7
  rectangle: 0.9,-2.3 1.5,-1.7
  rectangle: 2.5,-2.3 3.1,-1.7
  rectangle: 0.1,-3.1 0.7,-2.5
  rectangle: -0.7,-3.1 -0.1,-2.5
  rectangle: -1.5,-3.1 -0.9,-2.5
  rectangle: -2.3,-3.1 -1.7,-2.5
  rectangle: -3.1,-3.1 -2.5,-2.5
  rectangle: 1.7,-3.1 2.3,-2.5
  rectangle: 0.9,-3.1 1.5,-2.5
  rectangle: 2.5,-3.1 3.1,-2.5
Top Courtyard:
  lines w0.025: -8.65,-6.4 -8.65,6.4 -7.2,6.4 -7.2,7.2 -6.4,7.2 -6.4,8.65 6.4,8.65 6.4,7.2 7.2,7.2 7.2,6.4 8.65,6.4 8.65,-6.4 7.2,-6.4 7.2,-7.2 6.4,-7.2 6.4,-8.65 -6.4,-8.65 -6.4,-7.2 -7.2,-7.2 -7.2,-6.4 -8.65,-6.4
Top Assembly:
  drawing of 1489 lines, arcs and shapes, not listed
  text ".Designator" at -4.511,-0.453 h2
3D body "LQFP100.STEP": height 1.6, standoff 0, extent -8,-8 8,8

## QFN2x1.7-12L [mm] "QFN, 12 leads, 1.7mm x 2mm, 0.4mm pitch"
height 0.55
pads (12):
  round 0.025 smd paste-0.025 mask+0.05: 1(-0.8,-0.65)
  rect 0.2x0.6 smd paste-0.025 mask+0.05: 2(-0.4,-0.65) 3(0,-0.65) 4(0.4,-0.65) 7(0.8,0.65) 8(0.4,0.65) 9(0,0.65) 10(-0.4,0.65) 11(-0.8,0.65)
  rect 0.2x0.6 smd paste+0 mask+0.05: 5(0.8,-0.65)
  rect 0.6x0.2 smd paste-0.025 mask+0.05: 6(0.8,0) 12(-0.8,0)
Top Layer:
  region: -0.9,-0.95 -0.7,-0.95 -0.7,-0.35 -0.85,-0.35 -1.1,-0.35 -1.1,-0.5 -0.9,-0.5
Top Overlay:
  circle w0.2: c-1.3,-0.85 r0.1
  lines w0.2: -1.2,0.4 -1.2,0.85 ; 1.2,-0.85 1.2,-0.4 ; 1.2,0.4 1.2,0.85
Top Courtyard:
  lines w0.025: -1.45,-1.3 -1.45,1.3 1.45,1.3 1.45,-1.3 -1.45,-1.3
Top Assembly:
  circle w0.05: c-0.7,-0.55 r0.175
  lines w0.05: -1,-0.5 -1.02,-0.5 -1.02,-0.35 -1,-0.35 ; -1,-0.1 -1.02,-0.1 -1.02,0.1 -1,0.1 ; -0.9,-0.85 -0.9,-0.87 -0.7,-0.87 -0.7,-0.85 ; -0.9,0.85 -0.9,0.87 -0.7,0.87 -0.7,0.85 ; -0.5,-0.85 -0.5,-0.87 -0.3,-0.87 -0.3,-0.85 ; -0.5,0.85 -0.5,0.87 -0.3,0.87 -0.3,0.85 ; -0.1,-0.85 -0.1,-0.87 0.1,-0.87 0.1,-0.85 ; -0.1,0.85 -0.1,0.87 0.1,0.87 0.1,0.85 ; 0.3,-0.85 0.3,-0.87 0.5,-0.87 0.5,-0.85 ; 0.3,0.85 0.3,0.87 0.5,0.87 0.5,0.85 ; 0.7,-0.85 0.7,-0.87 0.9,-0.87 0.9,-0.85 ; 0.7,0.85 0.7,0.87 0.9,0.87 0.9,0.85 ; 1,-0.1 1.02,-0.1 1.02,0.1 1,0.1 ; -1,-0.85 -1,0.85 1,0.85 1,-0.85 -1,-0.85
  text ".Designator" at -2.252,-0.226 h1
3D body "QFN2x1.7-12L.x_t": height 0.57, standoff 0, extent -1.02,-0.87 1.02,0.87